# Altium footprint library MLG12516.PcbLib: 1 footprints
Each footprint in its own frame and in the unit in brackets; x right, y up, seen from the top. Pads: shape width x height; smd on the part's side, far side on the other; paste and mask are expansions set on the pad; w line width, h text height; cw(c..) or ccw(c..) is an arc to the next point about the centre after c.
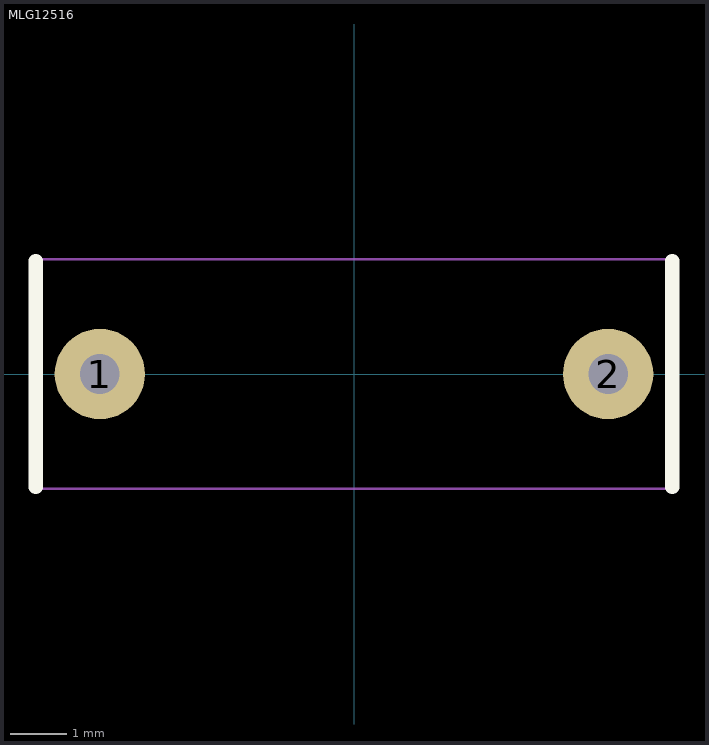
[diagram p0: the footprint, top view; thin cyan lines are the x and y axes]

## MLG12516 [mm] "CDS PHOTORESISTOR"
pads (2):
  round 1.6 hole 0.7: 1(-4.5,0) 2(4.5,0)
Top Overlay:
  lines w0.254: -5.635,-2 -5.635,2 ; 5.635,-2 5.635,2
Mechanical 1:
  lines w0.05: -5.588,-2.032 -5.588,2.032 5.588,2.032 5.588,-2.032 -5.588,-2.032